# Altium footprint library 865080343009.PcbLib: 1 footprints
Each footprint in its own frame and in the unit in brackets; x right, y up, seen from the top. Pads: shape width x height; smd on the part's side, far side on the other; paste and mask are expansions set on the pad; w line width, h text height; cw(c..) or ccw(c..) is an arc to the next point about the centre after c.
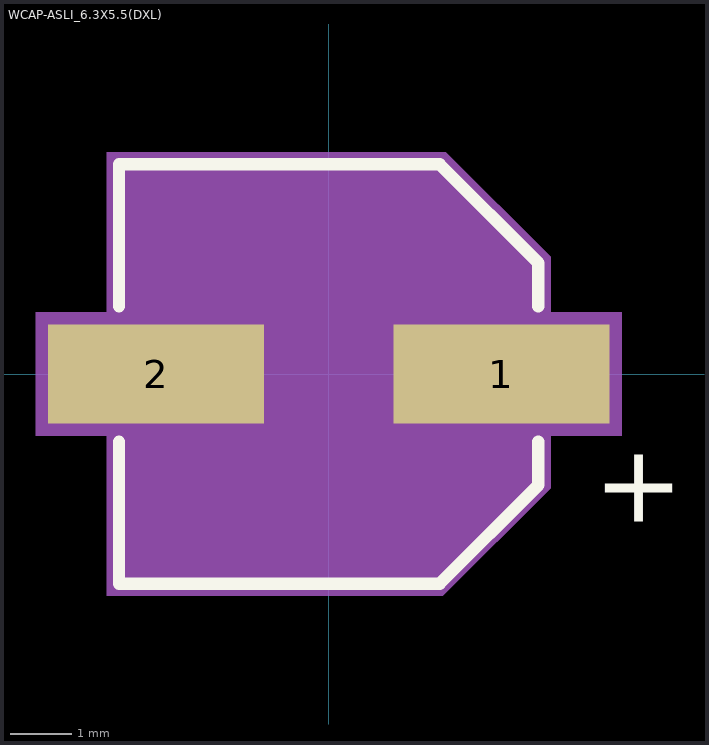
[diagram p0: the footprint, top view; thin cyan lines are the x and y axes]

## WCAP-ASLI_6.3X5.5(DXL) [mm]
pads (2):
  rect 3.5x1.6 smd: 1(2.8,0) 2(-2.8,0)
Top Overlay:
  lines w0.2: -3.4,-1.1 -3.4,-3.4 1.8,-3.4 3.4,-1.8 3.4,-1.1 ; -3.4,1.1 -3.4,3.4 1.8,3.4 3.4,1.8 3.4,1.1
  text "+" at 4.3,-2.4 h1.27
Assembly Top:
  circle w0.1: c0,0 r3.15
  lines w0.1: -3.3,-3.3 1.75,-3.3 3.3,-1.75 3.3,1.75 1.75,3.3 -3.3,3.3 -3.3,-3.3
  text "+" at 4.3,-2.4 h1.27
Courtyard Top:
  region: 3.6,1.9 3.6,1 4.75,1 4.75,-1 3.6,-1 3.6,-1.85 1.85,-3.6 -3.6,-3.6 -3.6,-1 -4.75,-1 -4.75,1 -3.6,1 -3.6,3.6 1.9,3.6
3D body "STP_WCAP-ASLI_6.3x5.5x2+(rev1).stp": height 5.35, standoff -0.15, extent -3.3,-3.65 3.3,3.65